# Altium footprint library AD5422BREZ.PcbLib: 3 footprints
Each footprint in its own frame and in the unit in brackets; x right, y up, seen from the top. Pads: shape width x height; smd on the part's side, far side on the other; paste and mask are expansions set on the pad; w line width, h text height; cw(c..) or ccw(c..) is an arc to the next point about the centre after c.
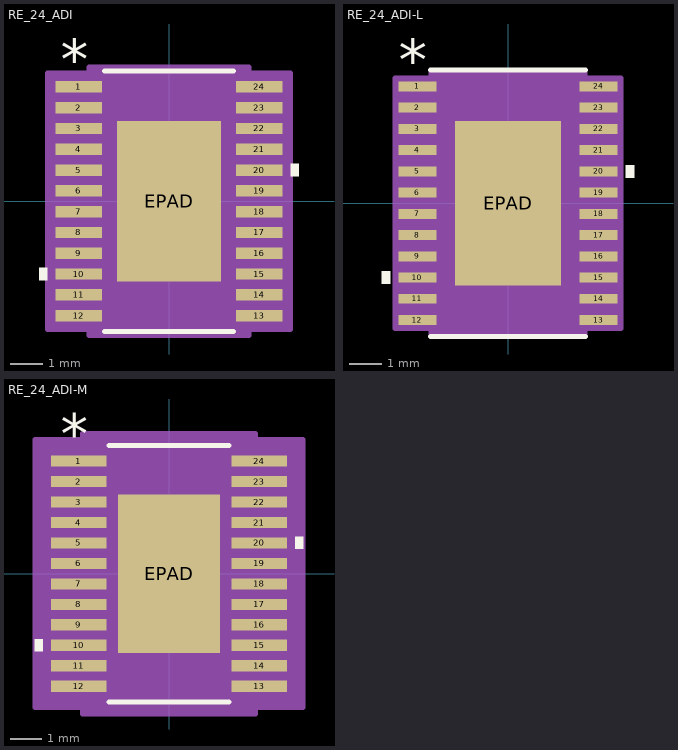
[diagram p0: the footprints below, top view; thin cyan lines are the x and y axes]

## RE_24_ADI [mil]
pads (25):
  rect 57.56x13.97 smd paste+0 mask+0: 1(-111,140.75) 2(-111,115.16) 3(-111,89.57) 4(-111,63.98) 5(-111,38.39) 6(-111,12.8) 7(-111,-12.8) 8(-111,-38.39) 9(-111,-63.98) 10(-111,-89.57) 11(-111,-115.16) 12(-111,-140.75) 13(111,-140.75) 14(111,-115.16) 15(111,-89.57) 16(111,-63.98) 17(111,-38.39) 18(111,-12.8) 19(111,12.8) 20(111,38.39) 21(111,63.98) 22(111,89.57) 23(111,115.16) 24(111,140.75)
  rect 128x198 smd paste-98.5 mask+0: EPAD(0,0)
Top Overlay:
  region: -149.78,-82.07 -159.78,-82.07 -159.78,-97.07 -149.78,-97.07
  region: 149.78,45.89 159.78,45.89 159.78,30.89 149.78,30.89
  lines w6: -79.29,-160.5 79.29,-160.5 ; -79.29,160.5 79.29,160.5
  text "*" at -133.5,149.72 h50
  text ".Designator" at -137.5,-25 h50
Top Paste:
  region: -3.94,95.06 -60.06,95.06 -60.06,36.94 -3.94,36.94
  region: -3.94,29.06 -60.06,29.06 -60.06,-29.06 -3.94,-29.06
  region: -3.94,-36.94 -60.06,-36.94 -60.06,-95.06 -3.94,-95.06
  region: 60.06,95.06 3.94,95.06 3.94,36.94 60.06,36.94
  region: 60.06,29.06 3.94,29.06 3.94,-29.06 60.06,-29.06
  region: 60.06,-36.94 3.94,-36.94 3.94,-95.06 60.06,-95.06
Mechanical 13:
  lines w1: -12,155.5 ccw(c0,155.5) 12,155.5 ; -126,-146.75 -126,-134.75 -88.5,-134.75 -88.5,-146.75 -126,-146.75 ; -126,-121.16 -126,-109.16 -88.5,-109.16 -88.5,-121.16 -126,-121.16 ; -126,-95.57 -126,-83.57 -88.5,-83.57 -88.5,-95.57 -126,-95.57 ; -126,-69.98 -126,-57.98 -88.5,-57.98 -88.5,-69.98 -126,-69.98 ; -126,-44.39 -126,-32.39 -88.5,-32.39 -88.5,-44.39 -126,-44.39 ; -126,-18.8 -126,-6.8 -88.5,-6.8 -88.5,-18.8 -126,-18.8 ; -126,6.8 -126,18.8 -88.5,18.8 -88.5,6.8 -126,6.8 ; -126,32.39 -126,44.39 -88.5,44.39 -88.5,32.39 -126,32.39 ; -126,57.98 -126,69.98 -88.5,69.98 -88.5,57.98 -126,57.98 ; -126,83.57 -126,95.57 -88.5,95.57 -88.5,83.57 -126,83.57 ; -126,109.16 -126,121.16 -88.5,121.16 -88.5,109.16 -126,109.16 ; -126,134.75 -126,146.75 -88.5,146.75 -88.5,134.75 -126,134.75 ; -88.5,-155.5 88.5,-155.5 88.5,155.5 -88.5,155.5 -88.5,-155.5 ; 88.5,-146.75 88.5,-134.75 126,-134.75 126,-146.75 88.5,-146.75 ; 88.5,-121.16 88.5,-109.16 126,-109.16 126,-121.16 88.5,-121.16 ; 88.5,-95.57 88.5,-83.57 126,-83.57 126,-95.57 88.5,-95.57 ; 88.5,-69.98 88.5,-57.98 126,-57.98 126,-69.98 88.5,-69.98 ; 88.5,-44.39 88.5,-32.39 126,-32.39 126,-44.39 88.5,-44.39 ; 88.5,-18.8 88.5,-6.8 126,-6.8 126,-18.8 88.5,-18.8 ; 88.5,6.8 88.5,18.8 126,18.8 126,6.8 88.5,6.8 ; 88.5,32.39 88.5,44.39 126,44.39 126,32.39 88.5,32.39 ; 88.5,57.98 88.5,69.98 126,69.98 126,57.98 88.5,57.98 ; 88.5,83.57 88.5,95.57 126,95.57 126,83.57 88.5,83.57 ; 88.5,109.16 88.5,121.16 126,121.16 126,109.16 88.5,109.16 ; 88.5,134.75 88.5,146.75 126,146.75 126,134.75 88.5,134.75
  text ".Designator" at -137.5,-25 h50
  text "*" at -86,102.5 h50
Mechanical 15:
  region: -98.5,-157.73 -149.78,-157.73 -149.78,157.73 -98.5,157.73 -98.5,165.5 98.5,165.5 98.5,157.73 149.78,157.73 149.78,-157.73 98.5,-157.73 98.5,-165.5 -98.5,-165.5
  lines w6: -149.78,-157.73 -149.78,157.73 -98.5,157.73 -98.5,165.5 98.5,165.5 98.5,157.73 149.78,157.73 149.78,-157.73 98.5,-157.73 98.5,-165.5 -98.5,-165.5 -98.5,-157.73 -149.78,-157.73
3D body "RE_24_ADI.step": height 47.09, standoff 0, extent -125.98,-155.51 125.98,155.51

## RE_24_ADI-L [mil]
pads (25):
  rect 45.75x12 smd paste+0 mask+0: 1(-109.03,140.75) 2(-109.03,115.16) 3(-109.03,89.57) 4(-109.03,63.98) 5(-109.03,38.39) 6(-109.03,12.8) 7(-109.03,-12.8) 8(-109.03,-38.39) 9(-109.03,-63.98) 10(-109.03,-89.57) 11(-109.03,-115.16) 12(-109.03,-140.75) 13(109.03,-140.75) 14(109.03,-115.16) 15(109.03,-89.57) 16(109.03,-63.98) 17(109.03,-38.39) 18(109.03,-12.8) 19(109.03,12.8) 20(109.03,38.39) 21(109.03,63.98) 22(109.03,89.57) 23(109.03,115.16) 24(109.03,140.75)
  rect 128x198 smd paste-98.5 mask+0: EPAD(0,0)
Top Overlay:
  region: -141.91,-82.07 -151.91,-82.07 -151.91,-97.07 -141.91,-97.07
  region: 141.91,45.89 151.91,45.89 151.91,30.89 141.91,30.89
  lines w6: -93.5,-160.5 93.5,-160.5 ; -93.5,160.5 93.5,160.5
  text "*" at -131.53,147.75 h50
  text ".Designator" at -137.5,-25 h50
Top Paste:
  region: -3.94,95.06 -60.06,95.06 -60.06,36.94 -3.94,36.94
  region: -3.94,29.06 -60.06,29.06 -60.06,-29.06 -3.94,-29.06
  region: -3.94,-36.94 -60.06,-36.94 -60.06,-95.06 -3.94,-95.06
  region: 60.06,95.06 3.94,95.06 3.94,36.94 60.06,36.94
  region: 60.06,29.06 3.94,29.06 3.94,-29.06 60.06,-29.06
  region: 60.06,-36.94 3.94,-36.94 3.94,-95.06 60.06,-95.06
Mechanical 13:
  lines w1: -12,155.5 ccw(c0,155.5) 12,155.5 ; -126,-146.75 -126,-134.75 -88.5,-134.75 -88.5,-146.75 -126,-146.75 ; -126,-121.16 -126,-109.16 -88.5,-109.16 -88.5,-121.16 -126,-121.16 ; -126,-95.57 -126,-83.57 -88.5,-83.57 -88.5,-95.57 -126,-95.57 ; -126,-69.98 -126,-57.98 -88.5,-57.98 -88.5,-69.98 -126,-69.98 ; -126,-44.39 -126,-32.39 -88.5,-32.39 -88.5,-44.39 -126,-44.39 ; -126,-18.8 -126,-6.8 -88.5,-6.8 -88.5,-18.8 -126,-18.8 ; -126,6.8 -126,18.8 -88.5,18.8 -88.5,6.8 -126,6.8 ; -126,32.39 -126,44.39 -88.5,44.39 -88.5,32.39 -126,32.39 ; -126,57.98 -126,69.98 -88.5,69.98 -88.5,57.98 -126,57.98 ; -126,83.57 -126,95.57 -88.5,95.57 -88.5,83.57 -126,83.57 ; -126,109.16 -126,121.16 -88.5,121.16 -88.5,109.16 -126,109.16 ; -126,134.75 -126,146.75 -88.5,146.75 -88.5,134.75 -126,134.75 ; -88.5,-155.5 88.5,-155.5 88.5,155.5 -88.5,155.5 -88.5,-155.5 ; 88.5,-146.75 88.5,-134.75 126,-134.75 126,-146.75 88.5,-146.75 ; 88.5,-121.16 88.5,-109.16 126,-109.16 126,-121.16 88.5,-121.16 ; 88.5,-95.57 88.5,-83.57 126,-83.57 126,-95.57 88.5,-95.57 ; 88.5,-69.98 88.5,-57.98 126,-57.98 126,-69.98 88.5,-69.98 ; 88.5,-44.39 88.5,-32.39 126,-32.39 126,-44.39 88.5,-44.39 ; 88.5,-18.8 88.5,-6.8 126,-6.8 126,-18.8 88.5,-18.8 ; 88.5,6.8 88.5,18.8 126,18.8 126,6.8 88.5,6.8 ; 88.5,32.39 88.5,44.39 126,44.39 126,32.39 88.5,32.39 ; 88.5,57.98 88.5,69.98 126,69.98 126,57.98 88.5,57.98 ; 88.5,83.57 88.5,95.57 126,95.57 126,83.57 88.5,83.57 ; 88.5,109.16 88.5,121.16 126,121.16 126,109.16 88.5,109.16 ; 88.5,134.75 88.5,146.75 126,146.75 126,134.75 88.5,134.75
  text ".Designator" at -137.5,-25 h50
  text "*" at -86,102.5 h50
Mechanical 15:
  region: -92.5,-150.75 -135.91,-150.75 -135.91,150.75 -92.5,150.75 -92.5,159.5 92.5,159.5 92.5,150.75 135.91,150.75 135.91,-150.75 92.5,-150.75 92.5,-159.5 -92.5,-159.5
  lines w6: -135.91,-150.75 -135.91,150.75 -92.5,150.75 -92.5,159.5 92.5,159.5 92.5,150.75 135.91,150.75 135.91,-150.75 92.5,-150.75 92.5,-159.5 -92.5,-159.5 -92.5,-150.75 -135.91,-150.75
3D body "RE_24_ADI.step": height 47.09, standoff 0, extent -125.98,-155.51 125.98,155.51

## RE_24_ADI-M [mm]
pads (25):
  rect 1.762x0.355 smd paste+0 mask+0: 1(-2.869,3.575) 2(-2.869,2.925) 3(-2.869,2.275) 4(-2.869,1.625) 5(-2.869,0.975) 6(-2.869,0.325) 7(-2.869,-0.325) 8(-2.869,-0.975) 9(-2.869,-1.625) 10(-2.869,-2.275) 11(-2.869,-2.925) 12(-2.869,-3.575) 13(2.869,-3.575) 14(2.869,-2.925) 15(2.869,-2.275) 16(2.869,-1.625) 17(2.869,-0.975) 18(2.869,-0.325) 19(2.869,0.325) 20(2.869,0.975) 21(2.869,1.625) 22(2.869,2.275) 23(2.869,2.925) 24(2.869,3.575)
  rect 3.251x5.029 smd paste-2.502 mask+0: EPAD(0,0)
Top Overlay:
  region: -4.004,-2.084 -4.258,-2.084 -4.258,-2.465 -4.004,-2.465
  region: 4.004,1.165 4.258,1.165 4.258,0.784 4.004,0.784
  lines w0.152: -1.914,-4.077 1.914,-4.077 ; -1.914,4.077 1.914,4.077
  text "*" at -3.441,3.803 h1.27
  text ".Designator" at -3.492,-0.635 h1.27
Top Paste:
  region: -0.1,2.415 -1.526,2.415 -1.526,0.938 -0.1,0.938
  region: -0.1,0.738 -1.526,0.738 -1.526,-0.738 -0.1,-0.738
  region: -0.1,-0.938 -1.526,-0.938 -1.526,-2.415 -0.1,-2.415
  region: 1.526,2.415 0.1,2.415 0.1,0.938 1.526,0.938
  region: 1.526,0.738 0.1,0.738 0.1,-0.738 1.526,-0.738
  region: 1.526,-0.938 0.1,-0.938 0.1,-2.415 1.526,-2.415
Mechanical 13:
  lines w0.025: -0.305,3.95 ccw(c0,3.95) 0.305,3.95 ; -3.2,-3.727 -3.2,-3.423 -2.248,-3.423 -2.248,-3.727 -3.2,-3.727 ; -3.2,-3.077 -3.2,-2.773 -2.248,-2.773 -2.248,-3.077 -3.2,-3.077 ; -3.2,-2.427 -3.2,-2.123 -2.248,-2.123 -2.248,-2.427 -3.2,-2.427 ; -3.2,-1.777 -3.2,-1.473 -2.248,-1.473 -2.248,-1.777 -3.2,-1.777 ; -3.2,-1.127 -3.2,-0.823 -2.248,-0.823 -2.248,-1.127 -3.2,-1.127 ; -3.2,-0.477 -3.2,-0.173 -2.248,-0.173 -2.248,-0.477 -3.2,-0.477 ; -3.2,0.173 -3.2,0.477 -2.248,0.477 -2.248,0.173 -3.2,0.173 ; -3.2,0.823 -3.2,1.127 -2.248,1.127 -2.248,0.823 -3.2,0.823 ; -3.2,1.473 -3.2,1.777 -2.248,1.777 -2.248,1.473 -3.2,1.473 ; -3.2,2.123 -3.2,2.427 -2.248,2.427 -2.248,2.123 -3.2,2.123 ; -3.2,2.773 -3.2,3.077 -2.248,3.077 -2.248,2.773 -3.2,2.773 ; -3.2,3.423 -3.2,3.727 -2.248,3.727 -2.248,3.423 -3.2,3.423 ; -2.248,-3.95 2.248,-3.95 2.248,3.95 -2.248,3.95 -2.248,-3.95 ; 2.248,-3.727 2.248,-3.423 3.2,-3.423 3.2,-3.727 2.248,-3.727 ; 2.248,-3.077 2.248,-2.773 3.2,-2.773 3.2,-3.077 2.248,-3.077 ; 2.248,-2.427 2.248,-2.123 3.2,-2.123 3.2,-2.427 2.248,-2.427 ; 2.248,-1.777 2.248,-1.473 3.2,-1.473 3.2,-1.777 2.248,-1.777 ; 2.248,-1.127 2.248,-0.823 3.2,-0.823 3.2,-1.127 2.248,-1.127 ; 2.248,-0.477 2.248,-0.173 3.2,-0.173 3.2,-0.477 2.248,-0.477 ; 2.248,0.173 2.248,0.477 3.2,0.477 3.2,0.173 2.248,0.173 ; 2.248,0.823 2.248,1.127 3.2,1.127 3.2,0.823 2.248,0.823 ; 2.248,1.473 2.248,1.777 3.2,1.777 3.2,1.473 2.248,1.473 ; 2.248,2.123 2.248,2.427 3.2,2.427 3.2,2.123 2.248,2.123 ; 2.248,2.773 2.248,3.077 3.2,3.077 3.2,2.773 2.248,2.773 ; 2.248,3.423 2.248,3.727 3.2,3.727 3.2,3.423 2.248,3.423
  text ".Designator" at -3.492,-0.635 h1.27
  text "*" at -2.184,2.603 h1.27
Mechanical 15:
  region: -2.756,-4.26 -4.258,-4.26 -4.258,4.26 -2.756,4.26 -2.756,4.458 2.756,4.458 2.756,4.26 4.258,4.26 4.258,-4.26 2.756,-4.26 2.756,-4.458 -2.756,-4.458
  lines w0.152: -4.258,-4.26 -4.258,4.26 -2.756,4.26 -2.756,4.458 2.756,4.458 2.756,4.26 4.258,4.26 4.258,-4.26 2.756,-4.26 2.756,-4.458 -2.756,-4.458 -2.756,-4.26 -4.258,-4.26
3D body "RE_24_ADI.step": height 1.2, standoff 0, extent -3.2,-3.95 3.2,3.95